# EAGLE library part HEADER-ESP01 (library madhu)
Header connector for ESP8266 ESP01
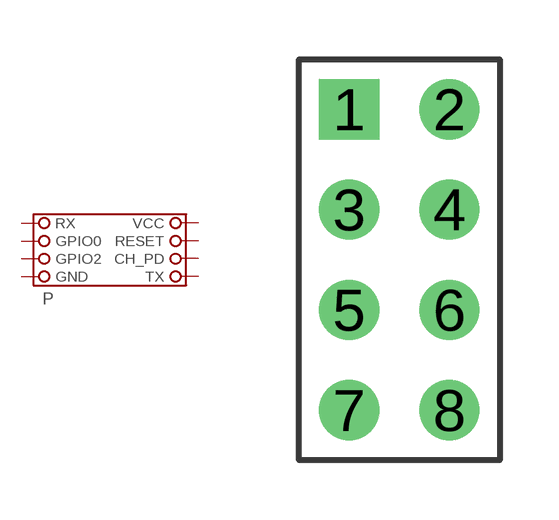
[diagram p22: symbol with the pads of HEADER-8; footprint HEADER-8]

Designator prefix P

## HEADER-ESP01  [HEADER-8]
1  RX
2  VCC
3  GPIO0
4  RESET
5  GPIO2
6  CH_PD
7  GND
8  TX

## Footprint HEADER-8 (pad centres in mm)
8 pin header grid 2.5 mm, outline 2.4 x 4.4 mm
drill 1.016 square: 1 -1.27,2.54
drill 1.016: 2 1.27,2.54; 3 -1.27,0; 4 1.27,0; 5 -1.27,-2.54; 6 1.27,-2.54; 7 -1.27,-5.08; 8 1.27,-5.08